# Altium footprint library PcbLib.PcbLib: 65 footprints (part 4 of 5)
Each footprint in its own frame and in the unit in brackets; x right, y up, seen from the top. Pads: shape width x height; smd on the part's side, far side on the other; paste and mask are expansions set on the pad; w line width, h text height; cw(c..) or ccw(c..) is an arc to the next point about the centre after c.
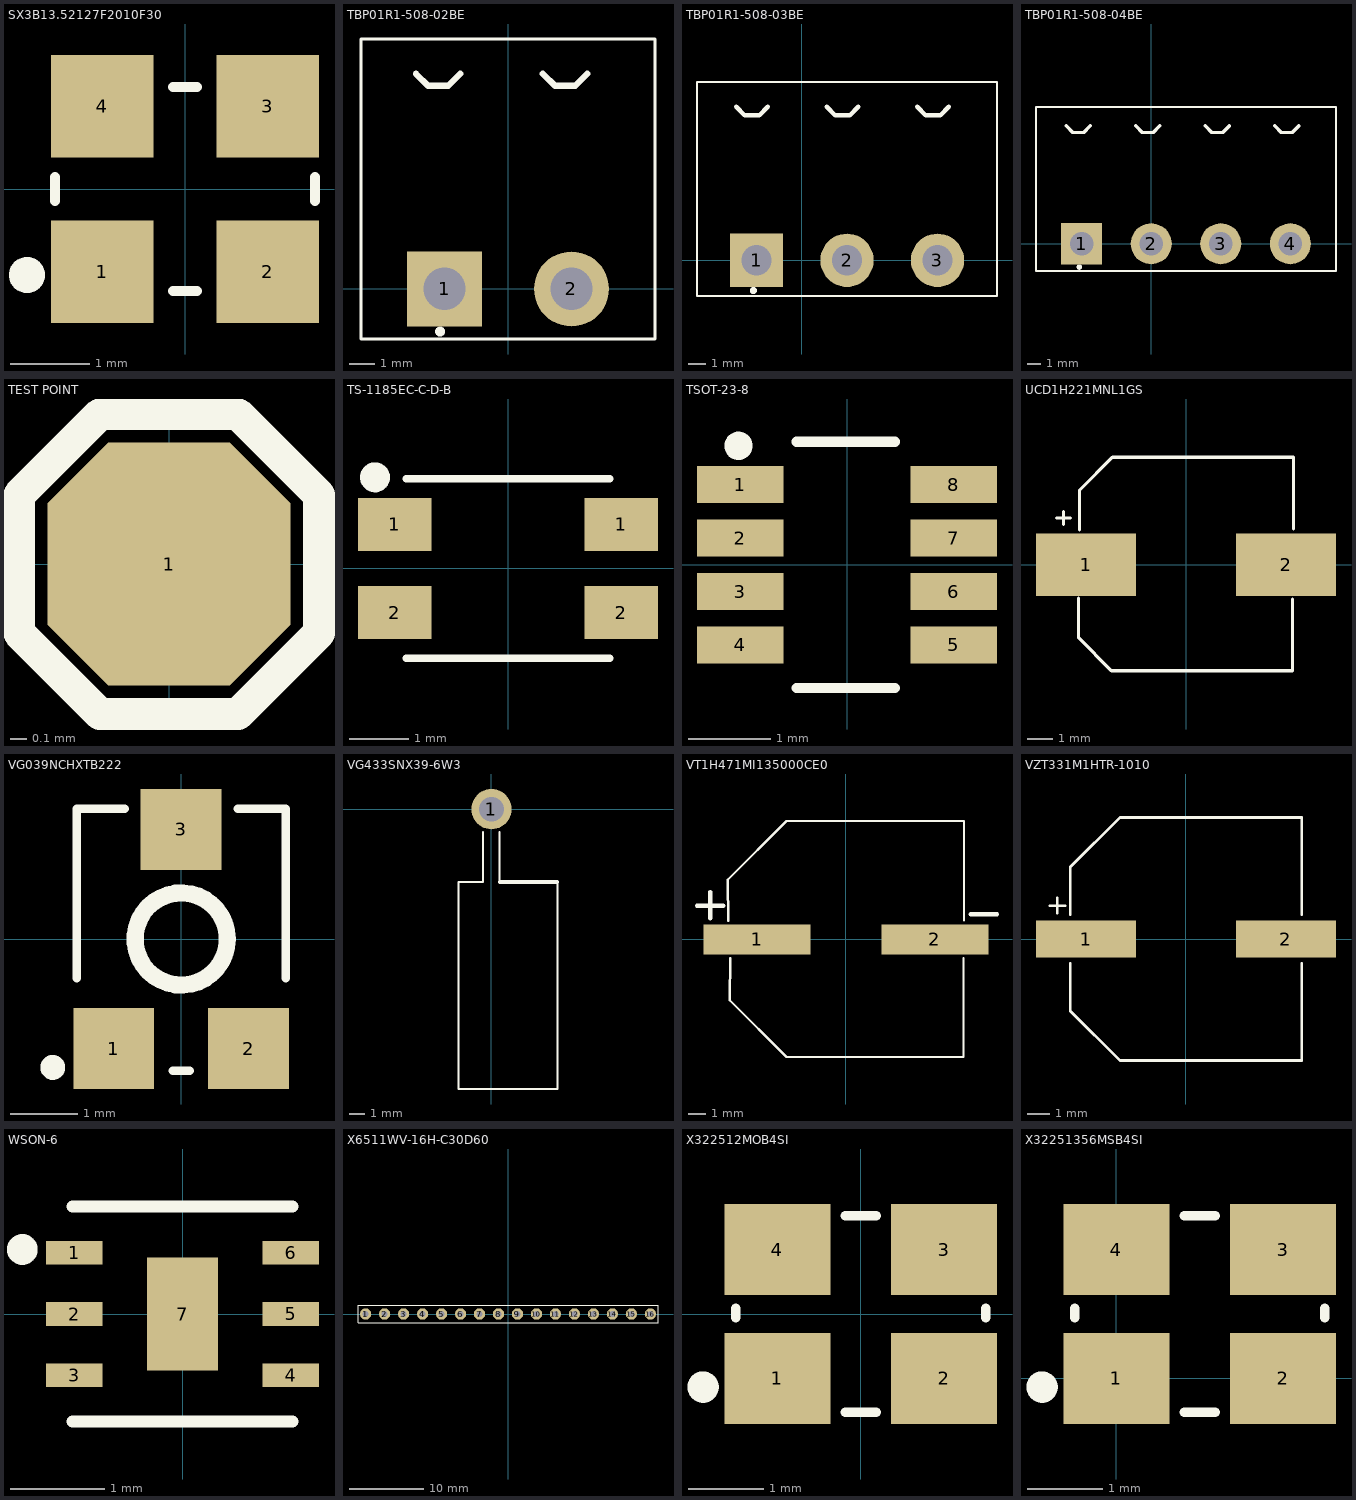
[diagram p3: the footprints below, top view; thin cyan lines are the x and y axes]

## SX3B13.52127F2010F30 [mm]
pads (4):
  rect 1.3x1.3 smd: 1(-1.05,-1.05) 2(1.05,-1.05) 3(1.05,1.05) 4(-1.05,1.05)
Top Overlay:
  circle w0.254: c-2.007,-1.092 r0.102
  lines w0.127: -1.651,-0.152 -1.651,0.152 ; -0.152,-1.295 0.152,-1.295 ; -0.152,1.295 0.152,1.295 ; 1.651,-0.152 1.651,0.152
3D body "ABM8G.STEP": height 0.99, standoff 0, extent -1.6,-1.245 1.6,1.245

## TBP01R1-508-02BE [mm]
pads (2):
  rect 3x3 hole 1.7: 1(-2.54,0)
  round 3 hole 1.7: 2(2.54,0)
Top Overlay:
  circle w0.2: c-2.718,-1.702 r0.1
  lines w0.127: -5.88,-2 5.88,-2 5.88,10 -5.88,10 -5.88,-2
  lines w0.254: -3.683,8.611 -3.2,8.128 -2.388,8.128 -1.905,8.611 ; 1.88,8.128 2.692,8.128 ; 1.88,8.128 1.397,8.611 1.88,8.128 ; 1.88,8.128 2.692,8.128 ; 2.692,8.128 3.175,8.611 2.692,8.128
3D body "CUI_DEVICES_TBP01R1-508-02BE.step": height 8.5, standoff -4, extent -5.829,-1.981 5.931,10.019

## TBP01R1-508-03BE [mm]
pads (3):
  rect 3x3 hole 1.7: 1(-2.54,0)
  round 3 hole 1.7: 2(2.54,0) 3(7.62,0)
Top Overlay:
  circle w0.2: c-2.718,-1.702 r0.1
  lines w0.127: -5.88,-2 -5.88,10 10.96,10 10.96,-2 -5.88,-2
  lines w0.254: -3.683,8.611 -3.2,8.128 -2.388,8.128 -1.905,8.611 ; 6.477,8.611 6.96,8.128 7.772,8.128 8.255,8.611 ; 1.88,8.128 2.692,8.128 ; 1.88,8.128 1.397,8.611 1.88,8.128 ; 1.88,8.128 2.692,8.128 ; 2.692,8.128 3.175,8.611 2.692,8.128
3D body "CUI_DEVICES_TBP01R1-508-03BE.step": height 8.5, standoff -4, extent -5.88,-2.043 10.96,9.957

## TBP01R1-508-04BE [mm]
pads (4):
  rect 3x3 hole 1.7: 1(-5.08,0)
  round 3 hole 1.7: 2(0,0) 3(5.08,0) 4(10.16,0)
Top Overlay:
  circle w0.2: c-5.258,-1.702 r0.1
  lines w0.127: -8.42,9.994 13.494,9.994 ; -8.42,10 -8.42,-2 13.494,-2 13.5,-1.994 13.5,10
  lines w0.254: -6.223,8.611 -5.74,8.128 -4.928,8.128 -4.445,8.611 ; -1.143,8.611 -0.66,8.128 0.152,8.128 0.635,8.611 ; 3.937,8.611 4.42,8.128 5.232,8.128 5.715,8.611 ; 9.017,8.611 9.5,8.128 10.312,8.128 10.795,8.611
3D body "CUI_DEVICES_TBP01R1-508-04BE.step": height 8.5, standoff -4, extent -8.458,-1.987 13.462,10.013

## TEST POINT [mil]
pads (1):
  oct 60x60 smd: 1(0,0)
Top Overlay:
  lines w7.87: -17,-37 17,-37 ; -17,-37 -37,-17 -37,17 -17,37 ; -17,-37 17,-37 ; -17,37 17,37 ; -17,37 17,37 ; 17,-37 37,-17 37,17 17,37

## TS-1185EC-C-D-B [mm]
pads (4):
  rect 1.25x0.9 smd: 1(-1.925,0.75) 1(1.925,0.75) 2(-1.925,-0.75) 2(1.925,-0.75)
Top Overlay:
  circle w0.254: c-2.261,1.549 r0.127
  lines w0.127: -1.727,-1.524 1.727,-1.524 ; -1.727,1.524 1.727,1.524
3D body "ts-1185ec-c-d-b.stp": height 2, standoff 0, extent -2.325,-1.5 2.325,1.5

## TSOT-23-8 [mm]
pads (8):
  rect 1.05x0.45 smd: 1(-1.3,0.975) 2(-1.3,0.325) 3(-1.3,-0.325) 4(-1.3,-0.975) 5(1.3,-0.975) 6(1.3,-0.325) 7(1.3,0.325) 8(1.3,0.975)
Top Overlay:
  circle w0.2: c-1.321,1.448 r0.072
  lines w0.127: -0.61,-1.499 0.584,-1.499 ; -0.61,1.499 0.584,1.499
3D body "User Library-TSOT-23-8.STEP": height 1, standoff 0, extent -1.4,-1.45 1.4,1.45

## UCD1H221MNL1GS [mm] "CAP ALUM 220UF 20% 50V SMD"
pads (2):
  rect 4x2.5 smd: 1(-4,0) 2(4,0)
Top Overlay:
  lines w0.127: -5.184,1.866 -4.63,1.866 ; -4.902,1.618 -4.902,2.121 ; -4.297,-1.346 -4.297,-2.93 -2.985,-4.242 4.255,-4.242 4.255,-1.372 ; -4.258,1.397 -4.258,2.981 -2.946,4.293 4.294,4.293 4.294,1.422
3D body "PCAP_8x10-ELECT_NCA.step": height 10.34, standoff 0, extent -4.673,-4.229 4.623,4.28

## VG039NCHXTB222 [mm]
pads (3):
  rect 1.2x1.2 smd: 1(-1,-1.625) 2(1,-1.625) 3(0,1.625)
Top Overlay:
  circle w0.254: c-1.905,-1.905 r0.057
  circle w0.254: c0,0 r0.684
  lines w0.127: -1.549,-0.584 -1.549,1.93 -0.838,1.93 ; -0.127,-1.956 0.127,-1.956 ; 0.838,1.93 1.549,1.93 1.549,-0.584
3D body "VG039NCHXTB222_C145162-3.STEP": height 1.1, standoff 0, extent -1.5,-1.925 1.5,1.875

## VG433SNX39-6W3 [mm]
pads (1):
  round 2.6 hole 1.6: 1(0,0)
Top Overlay:
  lines w0.12: -2.108,-18.034 4.242,-18.034
  lines w0.127: -2.108,-18.034 -2.108,-4.699 -0.533,-4.699 -0.533,-1.473 ; 0.533,-4.699 0.533,-1.473 ; 4.242,-18.034 4.242,-4.699
  lines w0.254: 0.533,-4.699 4.242,-4.699
3D body "User Library-SW868-TH13.step": height 7.15, standoff -1.25, extent -2.084,-17.989 4.216,0.311

## VT1H471MI135000CE0 [mm] "470uF ±20% 50V 12.5mm 13.5mm 1000hrs 105? -40?~+105? SMD,12.5x13.5mm Aluminum Electrolytic Capacitors - SMD RoHS"
pads (2):
  rect 6.2x1.75 smd: 1(-5.145,0) 2(5.145,0)
Top Overlay:
  lines w0.127: -6.818,1.067 -6.848,3.459 -3.449,6.858 6.833,6.858 6.833,1.092 ; -6.697,-1.092 -6.728,-3.528 -3.449,-6.807 6.797,-6.807 6.797,-1.067
  lines w0.254: -8.625,1.956 -7.101,1.956 ; -7.863,1.219 -7.863,2.743 ; 7.219,1.448 8.743,1.448
3D body "EEVTG1V471UQ.stp": height 14, standoff 0, extent -7.5,-6.85 7.5,6.85

## VZT331M1HTR-1010 [mm]
pads (2):
  rect 4.5x1.65 smd: 1(-4.5,0) 2(4.5,0)
Top Overlay:
  lines w0.127: -6.121,1.499 -5.436,1.499 ; -5.791,1.168 -5.791,1.854 ; -5.207,-1.092 -5.207,-3.242 -2.975,-5.474 5.207,-5.474 5.207,-1.092 ; -5.207,1.092 -5.207,3.242 -2.975,5.474 5.207,5.474 5.207,1.092

## WSON-6 [mm]
pads (7):
  rect 0.6x0.25 smd: 1(-1.15,0.65) 2(-1.15,0) 3(-1.15,-0.65) 4(1.15,-0.65) 5(1.15,0) 6(1.15,0.65)
  rect 0.75x1.2 smd: 7(0,0)
Top Overlay:
  circle w0.254: c-1.702,0.686 r0.036
  lines w0.127: -1.168,-1.143 1.168,-1.143 ; -1.168,1.143 1.168,1.143
3D body "NOPB.STEP": height 0.8, standoff 0, extent -1.25,-1.1 1.25,1.1

## X6511WV-16H-C30D60 [mil] "250V 3A Straight Square Pins 2.5mm 6mm -40?~+105? 1 16 3mm 2.54mm Black 1x16P Plugin,P=2.54mm Pin Headers ROHS"
pads (16):
  round 60 hole 30: 1(-750,0) 2(-650,0) 3(-550,0) 4(-450,0) 5(-350,0) 6(-250,0) 7(-150,0) 8(-50,0) 9(50,0) 10(150,0) 11(250,0) 12(350,0) 13(450,0) 14(550,0) 15(650,0) 16(750,0)
Top Overlay:
  lines w5: -790,-45 790,-45 790,45 -790,45 -790,-45
3D body "4-103321-7--3DModel-STEP-1.STEP": height 416.43, standoff -116.57, extent -792,-46 792,46

## X322512MOB4SI [mm]
pads (4):
  rect 1.4x1.2 smd: 1(-1.1,-0.85) 2(1.1,-0.85) 3(1.1,0.85) 4(-1.1,0.85)
Top Overlay:
  circle w0.254: c-2.083,-0.965 r0.08
  lines w0.127: -1.651,-0.051 -1.651,0.076 ; -0.203,-1.295 0.203,-1.295 ; -0.203,1.295 0.203,1.295 ; 1.651,-0.051 1.651,0.076
3D body "ABM8G.STEP": height 0.99, standoff 0, extent -1.6,-1.245 1.6,1.245

## X32251356MSB4SI [mm]
pads (4):
  rect 1.4x1.2 smd: 1(0,0) 2(2.2,0) 3(2.2,1.7) 4(0,1.7)
Top Overlay:
  circle w0.254: c-0.983,-0.115 r0.08
  lines w0.127: -0.551,0.799 -0.551,0.926 ; 0.897,-0.445 1.303,-0.445 ; 0.897,2.145 1.303,2.145 ; 2.751,0.799 2.751,0.926
3D body "ABM8G.STEP": height 0.99, standoff 0, extent -0.5,-0.395 2.7,2.095